# Altium integrated library EVT_SYS_CARRIER.IntLib: 51 symbols
Pins are listed as number, name and electrical type; pins without a type are passive.

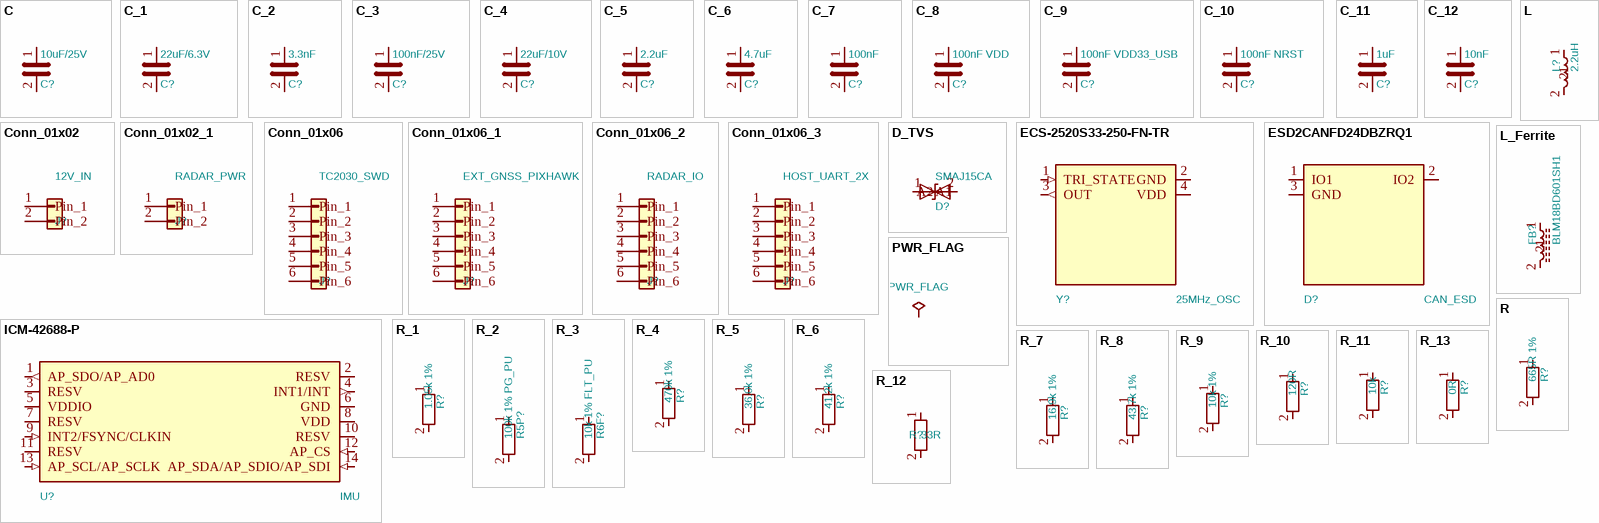
[diagram p0: symbols C to R_13]

## C
designator C?, comment 10uF/25V
MPN: 10uF_25V_X7R; hierarchy_path: /9ce958f3-6019-45fe-bc02-0cccce48adf8/8ef865ad-b15f-47f6-9f00-bb693d917fe2; Footprint: Capacitor_SMD:C_1206_3216Metric; Value: 10uF/25V
footprint C_1206_3216Metric
pins: 1, 2

## C_1
designator C?, comment 22uF/6.3V
MPN: 22uF_6.3V_X7R; hierarchy_path: /9ce958f3-6019-45fe-bc02-0cccce48adf8/8ef865ad-b15f-47f6-9f00-bb693d917fe2; Value: 22uF/6.3V; Footprint: Capacitor_SMD:C_1206_3216Metric
footprint C_1206_3216Metric
pins: 1, 2

## C_2
designator C?, comment 3.3nF
MPN: 3.3nF_X7R; hierarchy_path: /9ce958f3-6019-45fe-bc02-0cccce48adf8/8ef865ad-b15f-47f6-9f00-bb693d917fe2; Value: 3.3nF; Footprint: Capacitor_SMD:C_0603_1608Metric
footprint C_0603_1608Metric
pins: 1, 2

## C_3
designator C?, comment 100nF/25V
MPN: 100nF_25V_X7R; hierarchy_path: /9ce958f3-6019-45fe-bc02-0cccce48adf8/8ef865ad-b15f-47f6-9f00-bb693d917fe2; Value: 100nF/25V; Footprint: Capacitor_SMD:C_0603_1608Metric
footprint C_0603_1608Metric
pins: 1, 2

## C_4
designator C?, comment 22uF/10V
MPN: 22uF_10V_X7R; hierarchy_path: /9ce958f3-6019-45fe-bc02-0cccce48adf8/8ef865ad-b15f-47f6-9f00-bb693d917fe2; Value: 22uF/10V; Footprint: Capacitor_SMD:C_1206_3216Metric
footprint C_1206_3216Metric
pins: 1, 2

## C_5
designator C?, comment 2.2uF
MPN: 2.2uF_6.3V_X7R; hierarchy_path: /9ce958f3-6019-45fe-bc02-0cccce48adf8/eca40e6c-42e8-40ce-997d-d3259c6d70bc; Value: 2.2uF; Footprint: Capacitor_SMD:C_0603_1608Metric
footprint C_0603_1608Metric
pins: 1, 2

## C_6
designator C?, comment 4.7uF
MPN: 4.7uF_6.3V_X7R; hierarchy_path: /9ce958f3-6019-45fe-bc02-0cccce48adf8/eca40e6c-42e8-40ce-997d-d3259c6d70bc; Value: 4.7uF; Footprint: Capacitor_SMD:C_0805_2012Metric
footprint C_0805_2012Metric
pins: 1, 2

## C_7
designator C?, comment 100nF
MPN: 100nF_6.3V_X7R; hierarchy_path: /9ce958f3-6019-45fe-bc02-0cccce48adf8/eca40e6c-42e8-40ce-997d-d3259c6d70bc; Value: 100nF; Footprint: Capacitor_SMD:C_0402_1005Metric
footprint C_0402_1005Metric
pins: 1, 2

## C_8
designator C?, comment 100nF VDD
MPN: 100nF_6.3V_X7R; Decouples_U1_Pin: 15; hierarchy_path: /9ce958f3-6019-45fe-bc02-0cccce48adf8/eca40e6c-42e8-40ce-997d-d3259c6d70bc; Value: 100nF VDD; Footprint: Capacitor_SMD:C_0402_1005Metric
footprint C_0402_1005Metric
pins: 1, 2

## C_9
designator C?, comment 100nF VDD33_USB
MPN: 100nF_6.3V_X7R; Decouples_U1_Pin: 114; hierarchy_path: /9ce958f3-6019-45fe-bc02-0cccce48adf8/eca40e6c-42e8-40ce-997d-d3259c6d70bc; Value: 100nF VDD33_USB; Footprint: Capacitor_SMD:C_0402_1005Metric
footprint C_0402_1005Metric
pins: 1, 2

## C_10
designator C?, comment 100nF NRST
MPN: 100nF_6.3V_X7R; Filters_U1_Pin: 31; hierarchy_path: /9ce958f3-6019-45fe-bc02-0cccce48adf8/eca40e6c-42e8-40ce-997d-d3259c6d70bc; Value: 100nF NRST; Footprint: Capacitor_SMD:C_0402_1005Metric
footprint C_0402_1005Metric
pins: 1, 2

## C_11
designator C?, comment 1uF
MPN: 1uF_6.3V_X7R; hierarchy_path: /9ce958f3-6019-45fe-bc02-0cccce48adf8/eca40e6c-42e8-40ce-997d-d3259c6d70bc; Value: 1uF; Footprint: Capacitor_SMD:C_0603_1608Metric
footprint C_0603_1608Metric
pins: 1, 2

## C_12
designator C?, comment 10nF
MPN: 10nF_6.3V_X7R; hierarchy_path: /9ce958f3-6019-45fe-bc02-0cccce48adf8/241b9f8d-0f6d-4c6e-8897-d9638f4bbe65; Value: 10nF; Footprint: Capacitor_SMD:C_0402_1005Metric
footprint C_0402_1005Metric
pins: 1, 2

## Conn_01x02
designator J?, comment 12V_IN
MPN: 43650-0200; hierarchy_path: /9ce958f3-6019-45fe-bc02-0cccce48adf8/8ef865ad-b15f-47f6-9f00-bb693d917fe2; Footprint: SystemCarrier_Altium:Molex_43650-0200_RA_THT_2P; Value: 12V_IN
footprint Molex_43650-0200_RA_THT_2P
pins: 1 Pin_1, 2 Pin_2

## Conn_01x02_1
designator J?, comment RADAR_PWR
MPN: 43650-0200; hierarchy_path: /9ce958f3-6019-45fe-bc02-0cccce48adf8/4586aff2-28b2-41d1-b1d0-d420a17fa486; Value: RADAR_PWR; Footprint: SystemCarrier_Altium:Molex_43650-0200_RA_THT_2P
footprint Molex_43650-0200_RA_THT_2P
pins: 1 Pin_1, 2 Pin_2

## Conn_01x06
designator J?, comment TC2030_SWD
MPN: TC2030-NL_TARGET; hierarchy_path: /9ce958f3-6019-45fe-bc02-0cccce48adf8/eca40e6c-42e8-40ce-997d-d3259c6d70bc; Value: TC2030_SWD; Footprint: SystemCarrier_Altium:TagConnect_TC2030_NL
footprint TagConnect_TC2030_NL
pins: 1 Pin_1, 2 Pin_2, 3 Pin_3, 4 Pin_4, 5 Pin_5, 6 Pin_6

## Conn_01x06_1
designator J?, comment EXT_GNSS_PIXHAWK
MPN: SM06B-GHS-TB(LF)(SN); hierarchy_path: /9ce958f3-6019-45fe-bc02-0cccce48adf8/f1a35d3c-9d0c-4b86-b39c-b974cbb805b6; Value: EXT_GNSS_PIXHAWK; Footprint: Connector_JST:JST_GH_SM06B-GHS-TB_1x06-1MP_P1.25mm_Horizontal
footprint JST_GH_SM06B-GHS-TB_1x06-1MP_P1.25mm_Horizontal
pins: 1 Pin_1, 2 Pin_2, 3 Pin_3, 4 Pin_4, 5 Pin_5, 6 Pin_6

## Conn_01x06_2
designator J?, comment RADAR_IO
MPN: 43045-0600; hierarchy_path: /9ce958f3-6019-45fe-bc02-0cccce48adf8/4586aff2-28b2-41d1-b1d0-d420a17fa486; Value: RADAR_IO; Footprint: SystemCarrier_Altium:Molex_43045-0600_RA_THT_6P
footprint Molex_43045-0600_RA_THT_6P
pins: 1 Pin_1, 2 Pin_2, 3 Pin_3, 4 Pin_4, 5 Pin_5, 6 Pin_6

## Conn_01x06_3
designator J?, comment HOST_UART_2X
MPN: 43045-0600; hierarchy_path: /9ce958f3-6019-45fe-bc02-0cccce48adf8/2832ddd1-de9d-48ab-8137-5ba09d30c47d; Value: HOST_UART_2X; Footprint: SystemCarrier_Altium:Molex_43045-0600_RA_THT_6P
footprint Molex_43045-0600_RA_THT_6P
pins: 1 Pin_1, 2 Pin_2, 3 Pin_3, 4 Pin_4, 5 Pin_5, 6 Pin_6

## D_TVS
designator D?, comment SMAJ15CA
hierarchy_path: /9ce958f3-6019-45fe-bc02-0cccce48adf8/8ef865ad-b15f-47f6-9f00-bb693d917fe2; MPN: SMAJ15CA; Value: SMAJ15CA; Footprint: Diode_SMD:D_SMA
footprint D_SMA
pins: 1 A1, 2 A2

## ECS-2520S33-250-FN-TR
designator Y?, comment 25MHz_OSC
MPN: ECS-2520S33-250-FN-TR; Capture_Status: LOCAL_CONTRACT_SYMBOL; hierarchy_path: /9ce958f3-6019-45fe-bc02-0cccce48adf8/eca40e6c-42e8-40ce-997d-d3259c6d70bc; Value: 25MHz_OSC; Footprint: Oscillator:Oscillator_SMD_ECS_2520MV-xxx-xx-4Pin_2.5x2.0mm
footprint Oscillator_SMD_ECS_2520MV-xxx-xx-4Pin_2.5x2.0mm
pins: 1 TRI_STATE (in), 2 GND (power), 3 OUT (out), 4 VDD (power)

## ESD2CANFD24DBZRQ1
designator D?, comment CAN_ESD
MPN: ESD2CANFD24DBZRQ1; Capture_Status: LOCAL_CONTRACT_SYMBOL; hierarchy_path: /9ce958f3-6019-45fe-bc02-0cccce48adf8/4586aff2-28b2-41d1-b1d0-d420a17fa486; Value: CAN_ESD; Footprint: Package_TO_SOT_SMD:SOT-23
footprint SOT-23
pins: 1 IO1 (io), 2 IO2 (io), 3 GND

## ICM-42688-P
designator U?, comment IMU
MPN: ICM-42688-P; Capture_Status: LOCAL_CONTRACT_SYMBOL; hierarchy_path: /9ce958f3-6019-45fe-bc02-0cccce48adf8/241b9f8d-0f6d-4c6e-8897-d9638f4bbe65; Value: IMU; Footprint: SystemCarrier_Local:ICM-42688-P_LGA14_2.5x3mm_P0.5mm
footprint ICM-42688-P_LGA14_2.5x3mm_P0.5mm
pins: 1 AP_SDO/AP_AD0 (out), 2 RESV, 3 RESV, 4 INT1/INT (out), 5 VDDIO (power), 6 GND (power), 7 RESV, 8 VDD (power), 9 INT2/FSYNC/CLKIN (in), 10 RESV, 11 RESV, 12 AP_CS (in), 13 AP_SCL/AP_SCLK (in), 14 AP_SDA/AP_SDIO/AP_SDI (in)

## L
designator L?, comment 2.2uH
MPN: XFL4020-222MEC; hierarchy_path: /9ce958f3-6019-45fe-bc02-0cccce48adf8/8ef865ad-b15f-47f6-9f00-bb693d917fe2; Value: 2.2uH; Footprint: SystemCarrier_Altium:Coilcraft_XFL4020_4x4
footprint Coilcraft_XFL4020_4x4
pins: 1, 2

## L_Ferrite
designator FB?, comment BLM18BD601SH1
hierarchy_path: /9ce958f3-6019-45fe-bc02-0cccce48adf8/eca40e6c-42e8-40ce-997d-d3259c6d70bc; MPN: BLM18BD601SH1; Value: BLM18BD601SH1; Footprint: Inductor_SMD:L_0603_1608Metric
footprint L_0603_1608Metric
pins: 1, 2

## PWR_FLAG
designator #FLG?  (graphical)
hierarchy_path: /9ce958f3-6019-45fe-bc02-0cccce48adf8/8ef865ad-b15f-47f6-9f00-bb693d917fe2; Value: PWR_FLAG
pins: 1 (power)

## R
designator R?, comment 665R 1%
MPN: 665R_1%; hierarchy_path: /9ce958f3-6019-45fe-bc02-0cccce48adf8/8ef865ad-b15f-47f6-9f00-bb693d917fe2; Value: 665R 1%; Footprint: Resistor_SMD:R_0603_1608Metric
footprint R_0603_1608Metric
pins: 1, 2

## R_1
designator R?, comment 1.05k 1%
MPN: 1.05k_1%; hierarchy_path: /9ce958f3-6019-45fe-bc02-0cccce48adf8/8ef865ad-b15f-47f6-9f00-bb693d917fe2; Value: 1.05k 1%; Footprint: Resistor_SMD:R_0603_1608Metric
footprint R_0603_1608Metric
pins: 1, 2

## R_2
designator R5P?, comment 100k 1% PG_PU
MPN: 100k_1%; hierarchy_path: /9ce958f3-6019-45fe-bc02-0cccce48adf8/8ef865ad-b15f-47f6-9f00-bb693d917fe2; Value: 100k 1% PG_PU; Footprint: Resistor_SMD:R_0603_1608Metric
footprint R_0603_1608Metric
pins: 1, 2

## R_3
designator R6F?, comment 10k 1% FLT_PU
MPN: 10k_1%; hierarchy_path: /9ce958f3-6019-45fe-bc02-0cccce48adf8/8ef865ad-b15f-47f6-9f00-bb693d917fe2; Value: 10k 1% FLT_PU; Footprint: Resistor_SMD:R_0603_1608Metric
footprint R_0603_1608Metric
pins: 1, 2

## R_4
designator R?, comment 470k 1%
MPN: 470k_1%; hierarchy_path: /9ce958f3-6019-45fe-bc02-0cccce48adf8/8ef865ad-b15f-47f6-9f00-bb693d917fe2; Value: 470k 1%; Footprint: Resistor_SMD:R_0603_1608Metric
footprint R_0603_1608Metric
pins: 1, 2

## R_5
designator R?, comment 36.0k 1%
MPN: 36.0k_1%; hierarchy_path: /9ce958f3-6019-45fe-bc02-0cccce48adf8/8ef865ad-b15f-47f6-9f00-bb693d917fe2; Value: 36.0k 1%; Footprint: Resistor_SMD:R_0603_1608Metric
footprint R_0603_1608Metric
pins: 1, 2

## R_6
designator R?, comment 41.2k 1%
MPN: 41.2k_1%; hierarchy_path: /9ce958f3-6019-45fe-bc02-0cccce48adf8/8ef865ad-b15f-47f6-9f00-bb693d917fe2; Value: 41.2k 1%; Footprint: Resistor_SMD:R_0603_1608Metric
footprint R_0603_1608Metric
pins: 1, 2

## R_7
designator R?, comment 16.9k 1%
MPN: 16.9k_1%; hierarchy_path: /9ce958f3-6019-45fe-bc02-0cccce48adf8/8ef865ad-b15f-47f6-9f00-bb693d917fe2; Value: 16.9k 1%; Footprint: Resistor_SMD:R_0603_1608Metric
footprint R_0603_1608Metric
pins: 1, 2

## R_8
designator R?, comment 43.7k 1%
MPN: 43.7k_1%; hierarchy_path: /9ce958f3-6019-45fe-bc02-0cccce48adf8/8ef865ad-b15f-47f6-9f00-bb693d917fe2; Value: 43.7k 1%; Footprint: Resistor_SMD:R_0603_1608Metric
footprint R_0603_1608Metric
pins: 1, 2

## R_9
designator R?, comment 10k 1%
MPN: 10k_1%; hierarchy_path: /9ce958f3-6019-45fe-bc02-0cccce48adf8/eca40e6c-42e8-40ce-997d-d3259c6d70bc; Value: 10k 1%; Footprint: Resistor_SMD:R_0603_1608Metric
footprint R_0603_1608Metric
pins: 1, 2

## R_10
designator R?, comment 120R
MPN: 120R_1%; hierarchy_path: /9ce958f3-6019-45fe-bc02-0cccce48adf8/4586aff2-28b2-41d1-b1d0-d420a17fa486; Value: 120R; Footprint: Resistor_SMD:R_0603_1608Metric
footprint R_0603_1608Metric
pins: 1, 2

## R_11
designator R?, comment 10k
MPN: 10k_1%; hierarchy_path: /9ce958f3-6019-45fe-bc02-0cccce48adf8/4586aff2-28b2-41d1-b1d0-d420a17fa486; Value: 10k; Footprint: Resistor_SMD:R_0603_1608Metric
footprint R_0603_1608Metric
pins: 1, 2

## R_12
designator R?, comment 33R
MPN: 33R_1%; hierarchy_path: /9ce958f3-6019-45fe-bc02-0cccce48adf8/2832ddd1-de9d-48ab-8137-5ba09d30c47d; Value: 33R; Footprint: Resistor_SMD:R_0402_1005Metric
footprint R_0402_1005Metric
pins: 1, 2

## R_13
designator R?, comment 0R
hierarchy_path: /9ce958f3-6019-45fe-bc02-0cccce48adf8/6cb1464a-bb78-4666-9d5a-fa6b793f4d4c; MPN: 0R; Value: 0R; Footprint: Resistor_SMD:R_0603_1608Metric
footprint R_0603_1608Metric
pins: 1, 2

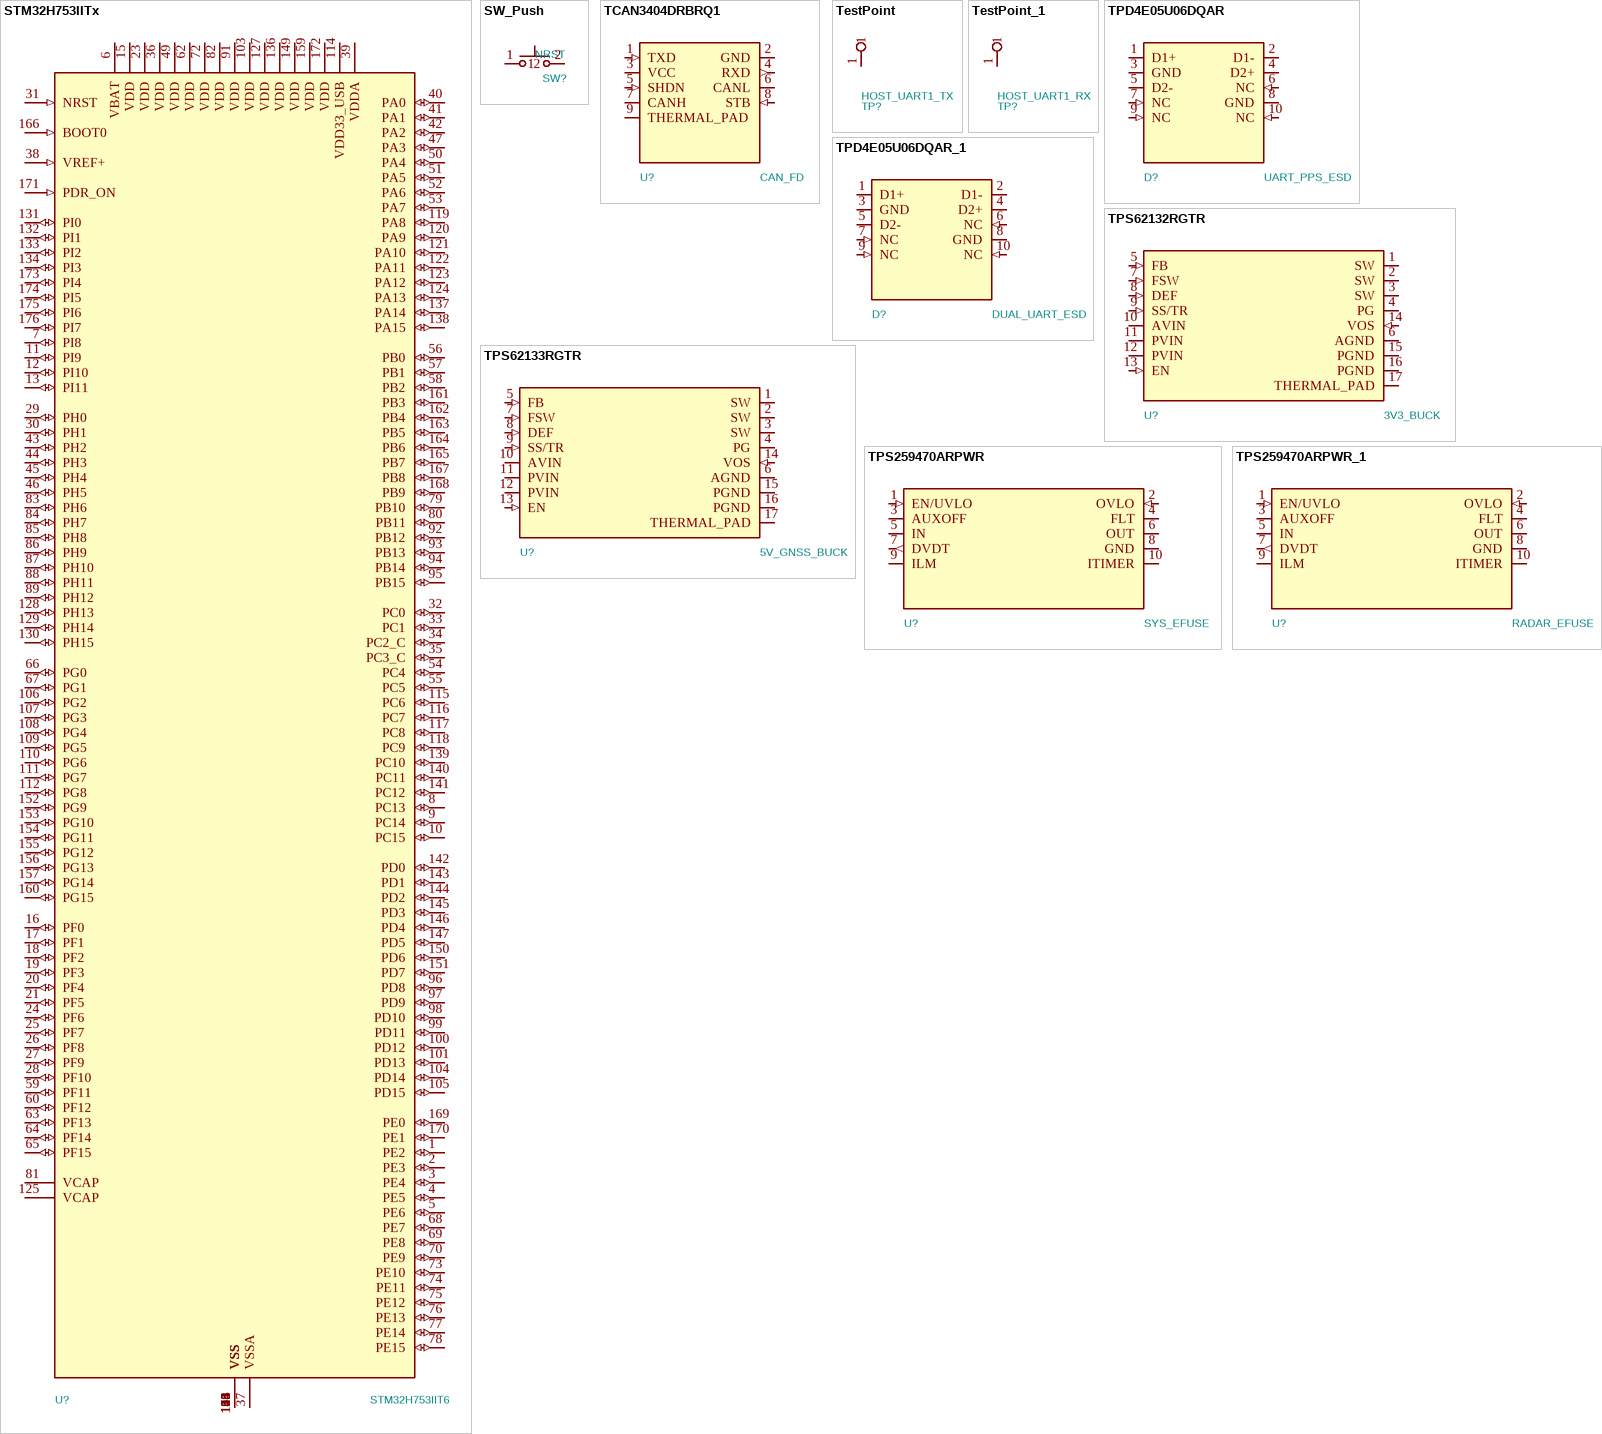
[diagram p1: symbols STM32H753IITx to TPS259470ARPWR_1]

## STM32H753IITx
designator U?, comment STM32H753IIT6
hierarchy_path: /9ce958f3-6019-45fe-bc02-0cccce48adf8/eca40e6c-42e8-40ce-997d-d3259c6d70bc; MPN: STM32H753IIT6; Value: STM32H753IIT6; Footprint: Package_QFP:LQFP-176_24x24mm_P0.5mm
footprint LQFP-176_24x24mm_P0.5mm
pins: 1 PE2 (io), 2 PE3 (io), 3 PE4 (io), 4 PE5 (io), 5 PE6 (io), 6 VBAT (power), 7 PI8 (io), 8 PC13 (io), 9 PC14 (io), 10 PC15 (io), 11 PI9 (io), 12 PI10 (io), 13 PI11 (io), 14 VSS (power), 15 VDD (power), 16 PF0 (io), 17 PF1 (io), 18 PF2 (io), 19 PF3 (io), 20 PF4 (io), 21 PF5 (io), 22 VSS, 23 VDD (power), 24 PF6 (io), 25 PF7 (io), 26 PF8 (io), 27 PF9 (io), 28 PF10 (io), 29 PH0 (io), 30 PH1 (io), 31 NRST (in), 32 PC0 (io), 33 PC1 (io), 34 PC2_C (io), 35 PC3_C (io), 36 VDD (power), 37 VSSA (power), 38 VREF+ (in), 39 VDDA (power), 40 PA0 (io), 41 PA1 (io), 42 PA2 (io), 43 PH2 (io), 44 PH3 (io), 45 PH4 (io), 46 PH5 (io), 47 PA3 (io), 48 VSS, 49 VDD (power), 50 PA4 (io), 51 PA5 (io), 52 PA6 (io), 53 PA7 (io), 54 PC4 (io), 55 PC5 (io), 56 PB0 (io), 57 PB1 (io), 58 PB2 (io), 59 PF11 (io), 60 PF12 (io), 61 VSS, 62 VDD (power), 63 PF13 (io), 64 PF14 (io), 65 PF15 (io), 66 PG0 (io), 67 PG1 (io), 68 PE7 (io), 69 PE8 (io), 70 PE9 (io), 71 VSS, 72 VDD (power), 73 PE10 (io), 74 PE11 (io), 75 PE12 (io), 76 PE13 (io), 77 PE14 (io), 78 PE15 (io), 79 PB10 (io), 80 PB11 (io), 81 VCAP (power), 82 VDD (power), 83 PH6 (io), 84 PH7 (io), 85 PH8 (io), 86 PH9 (io), 87 PH10 (io), 88 PH11 (io), 89 PH12 (io), 90 VSS, 91 VDD (power), 92 PB12 (io), 93 PB13 (io), 94 PB14 (io), 95 PB15 (io), 96 PD8 (io), 97 PD9 (io), 98 PD10 (io), 99 PD11 (io), 100 PD12 (io), 101 PD13 (io), 102 VSS, 103 VDD (power), 104 PD14 (io), 105 PD15 (io), 106 PG2 (io), 107 PG3 (io), 108 PG4 (io), 109 PG5 (io), 110 PG6 (io), 111 PG7 (io), 112 PG8 (io), 113 VSS, 114 VDD33_USB (power), 115 PC6 (io), 116 PC7 (io), 117 PC8 (io), 118 PC9 (io), 119 PA8 (io), 120 PA9 (io), 121 PA10 (io), 122 PA11 (io), 123 PA12 (io), 124 PA13 (io), 125 VCAP (power), 126 VSS, 127 VDD (power), 128 PH13 (io), 129 PH14 (io), 130 PH15 (io), 131 PI0 (io), 132 PI1 (io), 133 PI2 (io), 134 PI3 (io), 135 VSS, 136 VDD (power), 137 PA14 (io), 138 PA15 (io), 139 PC10 (io), 140 PC11 (io), 141 PC12 (io), 142 PD0 (io), 143 PD1 (io), 144 PD2 (io), 145 PD3 (io), 146 PD4 (io), 147 PD5 (io), 148 VSS, 149 VDD (power), 150 PD6 (io), 151 PD7 (io), 152 PG9 (io), 153 PG10 (io), 154 PG11 (io), 155 PG12 (io), 156 PG13 (io), 157 PG14 (io), 158 VSS, 159 VDD (power), 160 PG15 (io), 161 PB3 (io), 162 PB4 (io), 163 PB5 (io), 164 PB6 (io), 165 PB7 (io), 166 BOOT0 (in), 167 PB8 (io), 168 PB9 (io), 169 PE0 (io), 170 PE1 (io), 171 PDR_ON (in), 172 VDD (power), 173 PI4 (io), 174 PI5 (io), 175 PI6 (io), 176 PI7 (io)

## SW_Push
designator SW?, comment NRST
MPN: TL3301NF160QG; hierarchy_path: /9ce958f3-6019-45fe-bc02-0cccce48adf8/6cb1464a-bb78-4666-9d5a-fa6b793f4d4c; Value: NRST; Footprint: SystemCarrier_Altium:ESwitch_TL3301_GullWing_6x6
footprint ESwitch_TL3301_GullWing_6x6
pins: 1, 2

## TCAN3404DRBRQ1
designator U?, comment CAN_FD
MPN: TCAN3404DRBRQ1; Capture_Status: LOCAL_CONTRACT_SYMBOL; hierarchy_path: /9ce958f3-6019-45fe-bc02-0cccce48adf8/4586aff2-28b2-41d1-b1d0-d420a17fa486; Value: CAN_FD; Footprint: Package_DFN_QFN:Texas_DRB0008A
footprint Texas_DRB0008A
pins: 1 TXD (in), 2 GND (power), 3 VCC (power), 4 RXD (out), 5 SHDN (in), 6 CANL (io), 7 CANH (io), 8 STB (in), 9 THERMAL_PAD (power)

## TestPoint
designator TP?, comment HOST_UART1_TX
hierarchy_path: /9ce958f3-6019-45fe-bc02-0cccce48adf8/eca40e6c-42e8-40ce-997d-d3259c6d70bc; MPN: HOST_UART1_TX; Value: HOST_UART1_TX; Footprint: TestPoint:TestPoint_Pad_D1.0mm
footprint TestPoint_Pad_D1.0mm
pins: 1

## TestPoint_1
designator TP?, comment HOST_UART1_RX
hierarchy_path: /9ce958f3-6019-45fe-bc02-0cccce48adf8/eca40e6c-42e8-40ce-997d-d3259c6d70bc; MPN: HOST_UART1_RX; Value: HOST_UART1_RX; Footprint: TestPoint:TestPoint_Pad_D1.0mm
footprint TestPoint_Pad_D1.0mm
pins: 1

## TPD4E05U06DQAR
designator D?, comment UART_PPS_ESD
MPN: TPD4E05U06DQAR; Capture_Status: LOCAL_CONTRACT_SYMBOL; hierarchy_path: /9ce958f3-6019-45fe-bc02-0cccce48adf8/f1a35d3c-9d0c-4b86-b39c-b974cbb805b6; Value: UART_PPS_ESD; Footprint: Package_SON:USON-10_2.5x1.0mm_P0.5mm
footprint USON-10_2.5x1.0mm_P0.5mm
pins: 1 D1+ (io), 2 D1- (io), 3 GND, 4 D2+ (io), 5 D2- (io), 6 NC (in), 7 NC (in), 8 GND, 9 NC (in), 10 NC (in)

## TPD4E05U06DQAR_1
designator D?, comment DUAL_UART_ESD
MPN: TPD4E05U06DQAR; Capture_Status: LOCAL_CONTRACT_SYMBOL; hierarchy_path: /9ce958f3-6019-45fe-bc02-0cccce48adf8/2832ddd1-de9d-48ab-8137-5ba09d30c47d; Value: DUAL_UART_ESD; Footprint: Package_SON:USON-10_2.5x1.0mm_P0.5mm
footprint USON-10_2.5x1.0mm_P0.5mm
pins: 1 D1+ (io), 2 D1- (io), 3 GND, 4 D2+ (io), 5 D2- (io), 6 NC (in), 7 NC (in), 8 GND, 9 NC (in), 10 NC (in)

## TPS62132RGTR
designator U?, comment 3V3_BUCK
MPN: TPS62132RGTR; Capture_Status: LOCAL_CONTRACT_SYMBOL; hierarchy_path: /9ce958f3-6019-45fe-bc02-0cccce48adf8/8ef865ad-b15f-47f6-9f00-bb693d917fe2; Value: 3V3_BUCK; Footprint: Package_DFN_QFN:VQFN-16-1EP_3x3mm_P0.5mm_EP1.68x1.68mm
footprint VQFN-16-1EP_3x3mm_P0.5mm_EP1.68x1.68mm
pins: 1 SW, 2 SW, 3 SW, 4 PG (oc), 5 FB (in), 6 AGND (power), 7 FSW (in), 8 DEF (in), 9 SS/TR (in), 10 AVIN (power), 11 PVIN (power), 12 PVIN (power), 13 EN (in), 14 VOS (in), 15 PGND (power), 16 PGND (power), 17 THERMAL_PAD (power)

## TPS62133RGTR
designator U?, comment 5V_GNSS_BUCK
MPN: TPS62133RGTR; Capture_Status: LOCAL_CONTRACT_SYMBOL; hierarchy_path: /9ce958f3-6019-45fe-bc02-0cccce48adf8/8ef865ad-b15f-47f6-9f00-bb693d917fe2; Value: 5V_GNSS_BUCK; Footprint: Package_DFN_QFN:VQFN-16-1EP_3x3mm_P0.5mm_EP1.68x1.68mm
footprint VQFN-16-1EP_3x3mm_P0.5mm_EP1.68x1.68mm
pins: 1 SW, 2 SW, 3 SW, 4 PG (oc), 5 FB (in), 6 AGND (power), 7 FSW (in), 8 DEF (in), 9 SS/TR (in), 10 AVIN (power), 11 PVIN (power), 12 PVIN (power), 13 EN (in), 14 VOS (in), 15 PGND (power), 16 PGND (power), 17 THERMAL_PAD (power)

## TPS259470ARPWR
designator U?, comment SYS_EFUSE
MPN: TPS259470ARPWR; Capture_Status: LOCAL_CONTRACT_SYMBOL; hierarchy_path: /9ce958f3-6019-45fe-bc02-0cccce48adf8/8ef865ad-b15f-47f6-9f00-bb693d917fe2; Value: SYS_EFUSE; Footprint: SystemCarrier_Local:TPS259470A_RPW0010A_VQFN-HR-10_2x2mm_P0.475mm
footprint TPS259470A_RPW0010A_VQFN-HR-10_2x2mm_P0.475mm
pins: 1 EN/UVLO (in), 2 OVLO (in), 3 AUXOFF (oc), 4 FLT (oc), 5 IN (power), 6 OUT (power), 7 DVDT (out), 8 GND (power), 9 ILM (io), 10 ITIMER (io)

## TPS259470ARPWR_1
designator U?, comment RADAR_EFUSE
MPN: TPS259470ARPWR; Capture_Status: LOCAL_CONTRACT_SYMBOL; hierarchy_path: /9ce958f3-6019-45fe-bc02-0cccce48adf8/8ef865ad-b15f-47f6-9f00-bb693d917fe2; Value: RADAR_EFUSE; Footprint: SystemCarrier_Local:TPS259470A_RPW0010A_VQFN-HR-10_2x2mm_P0.475mm
footprint TPS259470A_RPW0010A_VQFN-HR-10_2x2mm_P0.475mm
pins: 1 EN/UVLO (in), 2 OVLO (in), 3 AUXOFF (oc), 4 FLT (oc), 5 IN (power), 6 OUT (power), 7 DVDT (out), 8 GND (power), 9 ILM (io), 10 ITIMER (io)